# EAGLE library part DWM3000 (library DWM3000)
6.5 & 8.0 GHz Ultra-Wideband (UWB) Module,Supply voltage: 2.5 to 3.6 V (VDD3V3), 1.62 to 3.6 V (VDD1). Source: Datasheet <https://www.qorvo.com/products/p/DWM3000#documents>
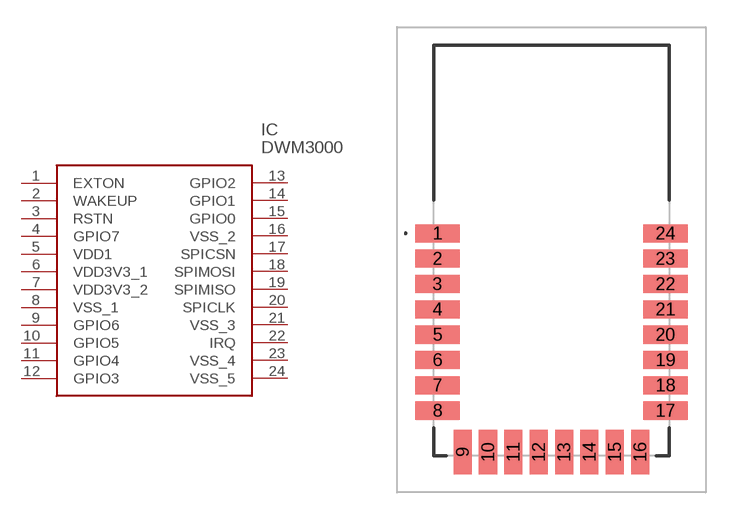
[diagram p0: symbol with the pads of DWM3000; footprint DWM3000]

Designator prefix IC

## DWM3000 (Description: 6.5 & 8.0 GHz Ultra-Wideband (UWB) Module,Supply voltage: 2.5 to 3.6 V (VDD3V3), 1.62 to 3.6 V (VDD1).; Height: 2.89mm; Manufacturer_Name: Qorvo; Manufacturer_Part_Number: DWM3000; Mouser_Part_Number: N/A; Mouser_Price-Stock: https://www.mouser.co.uk/ProductDetail/Qorvo/DWM3000?qs=iLbezkQI%252BsgcUwU6rIS9AQ%3D%3D)  [DWM3000]
1  EXTON
2  WAKEUP
3  RSTN
4  GPIO7
5  VDD1
6  VDD3V3_1
7  VDD3V3_2
8  VSS_1
9  GPIO6
10  GPIO5
11  GPIO4
12  GPIO3
13  GPIO2
14  GPIO1
15  GPIO0
16  VSS_2
17  SPICSN
18  SPIMOSI
19  SPIMISO
20  SPICLK
21  VSS_3
22  IRQ
23  VSS_4
24  VSS_5

## Footprint DWM3000 (pad centres in mm)
DWM3000-2
smd 2.45 x 1: 1 -6.295,0.95; 2 -6.295,-0.45; 3 -6.295,-1.85; 4 -6.295,-3.25; 5 -6.295,-4.65; 6 -6.295,-6.05; 7 -6.295,-7.45; 8 -6.295,-8.85; 17 6.295,-8.85; 18 6.295,-7.45; 19 6.295,-6.05; 20 6.295,-4.65; 21 6.295,-3.25; 22 6.295,-1.85; 23 6.295,-0.45; 24 6.295,0.95
smd 1 x 2.45: 9 -4.9,-11.145; 10 -3.5,-11.145; 11 -2.1,-11.145; 12 -0.7,-11.145; 13 0.7,-11.145; 14 2.1,-11.145; 15 3.5,-11.145; 16 4.9,-11.145